# EAGLE library part IC_BUFF_TXB0106 (library dp_devices.v6)
6-Bit birectional dual supply level translator
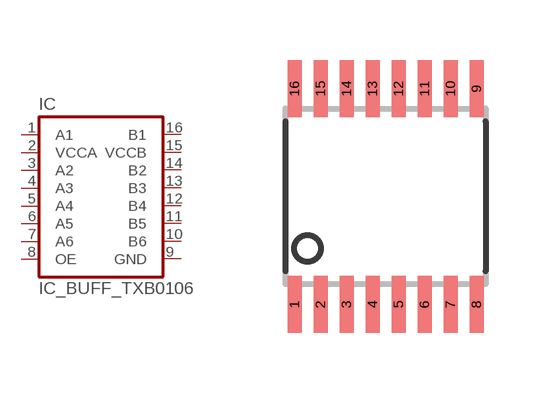
[diagram p168: symbol with the pads of TSSOP-16; footprint TSSOP-16]

Designator prefix IC

## IC_BUFF_TXB0106  [TSSOP-16]
1  A1
2  VCCA  sup
3  A2
4  A3
5  A4
6  A5
7  A6
8  OE  in
9  GND  sup
10  B6
11  B5
12  B4
13  B3
14  B2
15  VCCB  sup
16  B1

## Footprint TSSOP-16 (pad centres in mm)
smd 0.35 x 1.43: 1 -2.275,-2.7; 2 -1.625,-2.7; 3 -0.975,-2.7; 4 -0.325,-2.7; 5 0.325,-2.7; 6 0.975,-2.7; 7 1.625,-2.7; 8 2.275,-2.7; 9 2.275,2.7; 10 1.625,2.7; 11 0.975,2.7; 12 0.325,2.7; 13 -0.325,2.7; 14 -0.975,2.7; 15 -1.625,2.7; 16 -2.275,2.7